# Altium footprint library SamacSys.PcbLib: 1008 footprints (part 22 of 63)
Each footprint in its own frame and in the unit in brackets; x right, y up, seen from the top. Pads: shape width x height; smd on the part's side, far side on the other; paste and mask are expansions set on the pad; w line width, h text height; cw(c..) or ccw(c..) is an arc to the next point about the centre after c.
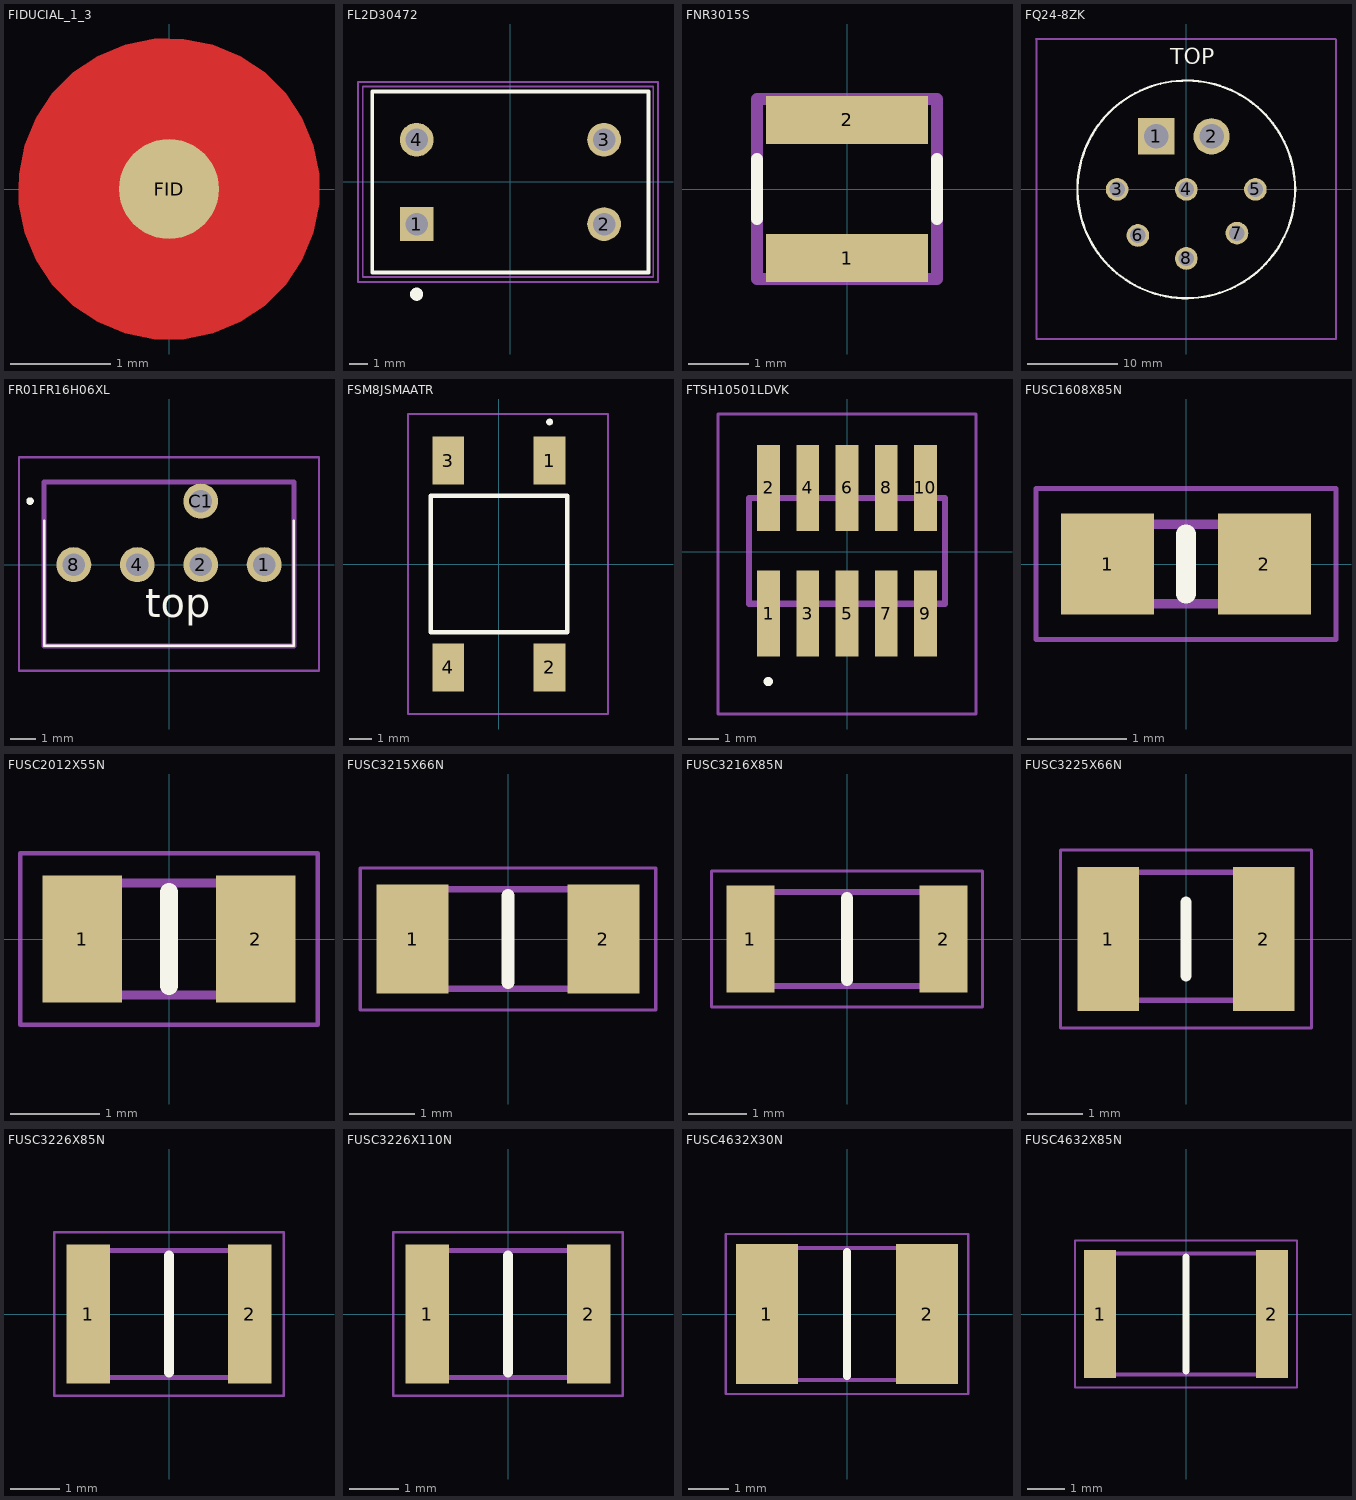
[diagram p21: the footprints below, top view; thin cyan lines are the x and y axes]

## FIDUCIAL_1_3 [mm] "Fiducial point Medium IN 1mm OUT 3mm"
pads (1):
  round 1 smd paste-2 mask+1: FID(0,0)
Top Layer:
  pour cut-out: 0,-1.5 -0.148,-1.5 -0.438,-1.442 -0.711,-1.329 -0.956,-1.165 -1.165,-0.956 -1.329,-0.711 -1.442,-0.438 -1.5,-0.148 -1.5,0 -1.5,0.148 -1.442,0.438 -1.329,0.711 -1.165,0.956 -0.956,1.165 -0.711,1.329 -0.438,1.442 -0.148,1.5 0,1.5 0.148,1.5 0.438,1.442 0.711,1.329 0.956,1.165 1.165,0.956 1.329,0.711 1.442,0.438 1.5,0.148 1.5,0 1.5,-0.148 1.442,-0.438 1.329,-0.711 1.165,-0.956 0.956,-1.165 0.711,-1.329 0.438,-1.442 0.148,-1.5

## FL2D30472 [mm]
pads (4):
  rect 1.8x1.8 hole 1.2: 1(-5,-2.25)
  round 1.8 hole 1.2: 2(5,-2.25) 3(5,2.25) 4(-5,2.25)
Top Overlay:
  lines w0.2: -7.366,-4.826 7.366,-4.826 7.366,4.826 -7.366,4.826 -7.366,-4.826
  lines w0.5: -5,-6.09 cw(c-5,-5.99) -5,-5.89 ; -5,-6.09 ccw(c-5,-5.99) -5,-5.89 ; -5,-6.09 ccw(c-5,-5.99) -5,-5.89
Assembly:
  lines w0.1: -7.874,-5.08 7.62,-5.08 7.62,5.08 -7.874,5.08 -7.874,-5.08
Countryard:
  lines w0.1: -8.128,-5.334 7.874,-5.334 7.874,5.334 -8.128,5.334 -8.128,-5.334
3D body "FL2D-30-472.stp": height 18.05, standoff -3.95, extent -7.4,-4.8 7.4,4.8

## FNR3015S [mm]
height 1.5
pads (2):
  rect 2.7x0.8 smd: 1(0,-1.15) 2(0,1.15)
Top Overlay:
  lines w0.2: -1.5,-0.5 -1.5,0.5 ; 1.5,-0.5 1.5,0.5
Assembly:
  lines w0.2: -1.5,-1.5 1.5,-1.5 1.5,1.5 -1.5,1.5 -1.5,-1.5
Countryard:
  lines w0.1: -1.5,-1.5 1.5,-1.5 1.5,1.5 -1.5,1.5 -1.5,-1.5
3D body "Coilcraft-LPS3015.step": height 1.5, standoff 0, extent -1.515,-1.515 1.515,1.515

## FQ24-8ZK [mm]
height 10
pads (8):
  rect 4x4 hole 2.7: 1(-3.302,5.842)
  round 4 hole 2.7: 2(2.794,5.842)
  round 2.5 hole 1.7: 3(-7.62,0) 4(0,0) 5(7.62,0) 6(-5.334,-5.08) 7(5.588,-4.826) 8(0,-7.62)
Top Overlay:
  circle w0.254: c0,0 r12
  text "TOP" at -1.778,13.208 h3
Top Assembly:
  lines w0.2: -16.559,16.579 16.441,16.579 ; -16.5,16.5 -16.5,-16.5 16.5,-16.5 ; 16.5,-16.48 16.5,16.52
Countryard:
  lines w0.1: -0.984,0 1.016,0 ; 0,-1 0,1

## FR01FR16H06XL [mm]
pads (5):
  round 1.4 hole 0.9: 1(3.81,0) 2(1.27,0) 4(-1.27,0) 8(-3.81,0) C1(1.27,2.54)
Top Overlay:
  lines w0.1: -5,-3.25 -5,1.75 -5,-3.25 ; -5,-3.25 5,-3.25 ; -5,-3.25 5,-3.25 ; 5,-3.25 5,1.75 5,-3.25
  lines w0.2: -5.61,2.54 ccw(c-5.56,2.54) -5.51,2.54 ; -5.61,2.54 cw(c-5.56,2.54) -5.51,2.54 ; -5.61,2.54 ccw(c-5.56,2.54) -5.51,2.54
  text "top" at -0.946,-2.507 h2
Assembly:
  lines w0.2: -5,-3.25 5,-3.25 5,3.3 -5,3.3 -5,-3.25
Countryard:
  lines w0.1: -6,-4.25 6,-4.25 6,4.3 -6,4.3 -6,-4.25
3D body "FR01FR16H.stp": height 10, standoff -2.72, extent -5.004,-3.302 5.004,3.251

## FSM8JSMAATR [mm]
pads (4):
  rect 1.4x2.1 smd: 1(2.23,4.55) 2(2.23,-4.55) 3(-2.23,4.55) 4(-2.23,-4.55)
Top Overlay:
  lines w0.2: 2.23,6.2 ccw(c2.23,6.25) 2.23,6.3 ; 2.23,6.2 cw(c2.23,6.25) 2.23,6.3 ; 2.23,6.2 ccw(c2.23,6.25) 2.23,6.3 ; -3,-3 -3,3 3,3 3,-3 -3,-3
Assembly:
  lines w0.1: -3,-3 -3,3 3,3 3,-3 -3,-3
Countryard:
  lines w0.1: -4,-6.6 -4,6.6 4.8,6.6 4.8,-6.6 -4,-6.6
3D body "FSM8JSMAATR.stp": height 9.56, standoff 0, extent -2.6,-5 3.4,5

## FTSH10501LDVK [mm]
pads (10):
  rect 0.74x2.79 smd: 1(-2.54,-2) 2(-2.54,2.07) 3(-1.27,-2) 4(-1.27,2.07) 5(0,-2) 6(0,2.07) 7(1.27,-2) 8(1.27,2.07) 9(2.54,-2) 10(2.54,2.07)
Top Overlay:
  lines w0.2: -2.6,-4.2 ccw(c-2.55,-4.2) -2.5,-4.2 ; -2.6,-4.2 cw(c-2.55,-4.2) -2.5,-4.2 ; -2.6,-4.2 ccw(c-2.55,-4.2) -2.5,-4.2
Assembly:
  lines w0.2: -3.175,-1.68 3.175,-1.68 3.175,1.75 -3.175,1.75 -3.175,-1.68
Countryard:
  lines w0.1: -4.175,-5.25 4.175,-5.25 4.175,4.465 -4.175,4.465 -4.175,-5.25
3D body "FTSH-105-01-L-DV-K.stp": height 6.13, standoff 0, extent -3.175,-2.925 3.175,2.925

## FUSC1608X85N [mm]
pads (2):
  rect 0.94x1.02 smd: 1(-0.79,0) 2(0.79,0)
Top Overlay:
  lines w0.2: 0,-0.3 0,0.3
Assembly:
  lines w0.1: -0.8,-0.4 -0.8,0.4 0.8,0.4 0.8,-0.4 -0.8,-0.4
Countryard:
  lines w0.05: -1.51,-0.76 -1.51,0.76 1.51,0.76 1.51,-0.76 -1.51,-0.76
3D body "FEMTOSMDC010F-2.stp": height 0.85, standoff 0.01, extent -0.801,-0.401 0.801,0.401

## FUSC2012X55N [mm]
pads (2):
  rect 0.89x1.42 smd: 1(-0.97,0) 2(0.97,0)
Top Overlay:
  lines w0.2: 0,-0.525 0,0.525
Assembly:
  lines w0.1: -1,-0.625 1,-0.625 1,0.625 -1,0.625 -1,-0.625
Countryard:
  lines w0.05: -1.665,-0.96 1.665,-0.96 1.665,0.96 -1.665,0.96 -1.665,-0.96
3D body "MFU0805FF00500P100.stp": height 0.55, standoff 0, extent -1,-0.625 1,0.625

## FUSC3215X66N [mm]
pads (2):
  rect 1.1x1.67 smd: 1(-1.46,0) 2(1.46,0)
Top Overlay:
  lines w0.2: 0,-0.662 0,0.662
Assembly:
  lines w0.1: -1.588,-0.762 1.588,-0.762 1.588,0.762 -1.588,0.762 -1.588,-0.762
Countryard:
  lines w0.05: -2.26,-1.085 2.26,-1.085 2.26,1.085 -2.26,1.085 -2.26,-1.085
3D body "0466005.NR.stp": height 0.66, standoff 0, extent -1.587,-0.762 1.587,0.762

## FUSC3216X85N [mm]
pads (2):
  rect 0.82x1.82 smd: 1(-1.65,0) 2(1.65,0)
Top Overlay:
  lines w0.2: 0,-0.7 0,0.7
Assembly:
  lines w0.1: -1.6,-0.8 -1.6,0.8 1.6,0.8 1.6,-0.8 -1.6,-0.8
Countryard:
  lines w0.05: -2.31,-1.16 -2.31,1.16 2.31,1.16 2.31,-1.16 -2.31,-1.16
3D body "MF-NSMF035-2.stp": height 0.85, standoff 0, extent -1.6,-0.8 1.6,0.8

## FUSC3225X66N [mm]
pads (2):
  rect 1.1x2.6 smd mask+0.102: 1(-1.4,0) 2(1.4,0)
Top Overlay:
  lines w0.2: 0,-0.662 0,0.662
Assembly:
  lines w0.1: -1.588,-1.1 -1.588,1.2 1.588,1.2 1.588,-1.1 -1.588,-1.1
Countryard:
  lines w0.05: -2.26,-1.6 -2.26,1.6 2.26,1.6 2.26,-1.6 -2.26,-1.6
3D body "0466005.NR.stp": height 0.66, standoff 0, extent -1.587,-0.362 1.587,1.162
3D body "0466005.NR.stp": height 0.66, standoff 0, extent -1.587,-1.062 1.587,0.462

## FUSC3226X85N [mm]
pads (2):
  rect 0.88x2.81 smd: 1(-1.635,0) 2(1.635,0)
Top Overlay:
  lines w0.2: 0,-1.188 0,1.188
Assembly:
  lines w0.1: -1.608,-1.288 -1.608,1.288 1.608,1.288 1.608,-1.288 -1.608,-1.288
Countryard:
  lines w0.05: -2.325,-1.655 -2.325,1.655 2.325,1.655 2.325,-1.655 -2.325,-1.655
3D body "MF-USMF110-2.stp": height 0.85, standoff 0, extent -1.607,-1.288 1.607,1.288

## FUSC3226X110N [mm]
pads (2):
  rect 0.88x2.81 smd: 1(-1.635,0) 2(1.635,0)
Top Overlay:
  lines w0.2: 0,-1.188 0,1.188
Countryard:
  lines w0.1: -1.608,-1.288 1.608,-1.288 1.608,1.288 -1.608,1.288 -1.608,-1.288
Board Shape (Mech20):
  lines w0.05: -2.325,-1.655 2.325,-1.655 2.325,1.655 -2.325,1.655 -2.325,-1.655
3D body "MF-USMF110-2.stp": height 0.85, standoff 0, extent -1.607,-1.288 1.607,1.288

## FUSC4632X30N [mm]
pads (2):
  rect 1.52x3.43 smd: 1(-1.965,0) 2(1.965,0)
Top Overlay:
  lines w0.2: 0,-1.52 0,1.52
Assembly:
  lines w0.1: -2.275,-1.62 -2.275,1.62 2.275,1.62 2.275,-1.62 -2.275,-1.62
Countryard:
  lines w0.05: -2.975,-1.965 -2.975,1.965 2.975,1.965 2.975,-1.965 -2.975,-1.965
3D body "MF-MSMF020-2.stp": height 0.3, standoff 0, extent -2.275,-1.62 2.275,1.62

## FUSC4632X85N [mm]
pads (2):
  rect 0.85x3.43 smd: 1(-2.3,0) 2(2.3,0)
Top Overlay:
  lines w0.2: 0,-1.52 0,1.52
Assembly:
  lines w0.1: -2.275,-1.62 2.275,-1.62 2.275,1.62 -2.275,1.62 -2.275,-1.62
Countryard:
  lines w0.05: -2.975,-1.965 2.975,-1.965 2.975,1.965 -2.975,1.965 -2.975,-1.965
3D body "MF-MSMF110_16-2.stp": height 0.85, standoff 0, extent -2.275,-1.62 2.275,1.62